# Altium integrated library SSK01-MPH-254-A6.IntLib: 1 symbol
Pins are listed as number, name and electrical type; pins without a type are passive.

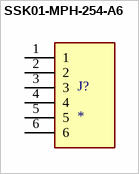
[diagram p0: symbol SSK01-MPH-254-A6]

## SSK01-MPH-254-A6
designator J?
2.54MM MALE HEADER 1X6PIN, STRAI; MF: Same Sky (Formerly CUI Devices); MP: SSK01-MPH-254-A6; SnapEDA_Link: https://www.snapeda.com/parts/SSK01-MPH-254-A6/Same+Sky/view-part/?ref=snap; Package: None; Value: *; Check_prices: https://www.snapeda.com/parts/SSK01-MPH-254-A6/Same+Sky/view-part/?ref=eda
footprint SAMESKY_SSK01-MPH-254-A6
pins: 1, 2, 3, 4, 5, 6